# Altium footprint library TLV9034PWR.PcbLib: 4 footprints
Each footprint in its own frame and in the unit in brackets; x right, y up, seen from the top. Pads: shape width x height; smd on the part's side, far side on the other; paste and mask are expansions set on the pad; w line width, h text height; cw(c..) or ccw(c..) is an arc to the next point about the centre after c.
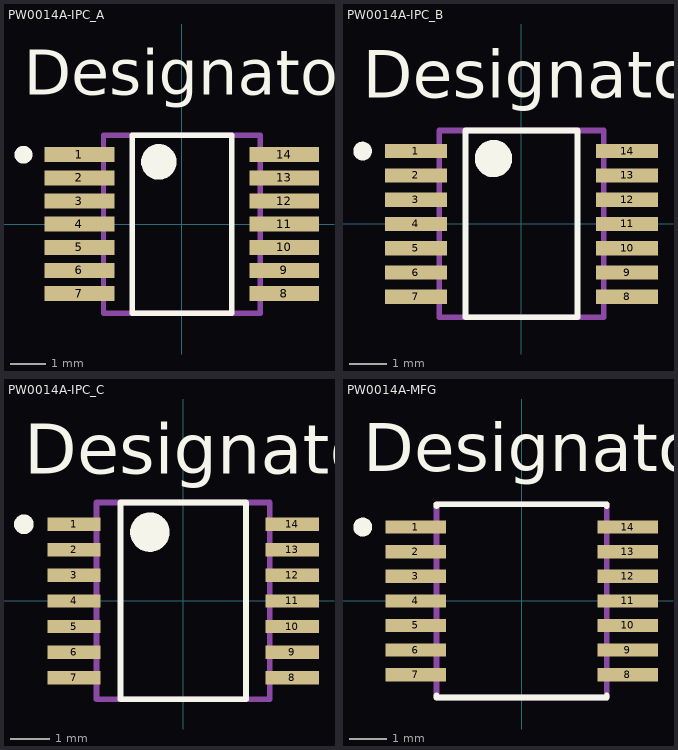
[diagram p0: the footprints below, top view; thin cyan lines are the x and y axes]

## PW0014A-IPC_A [mm]
pads (14):
  rect 1.955x0.421 smd paste+0 mask+0: 1(-2.875,1.95) 2(-2.875,1.3) 3(-2.875,0.65) 4(-2.875,0) 5(-2.875,-0.65) 6(-2.875,-1.3) 7(-2.875,-1.95) 8(2.875,-1.95) 9(2.875,-1.3) 10(2.875,-0.65) 11(2.875,0) 12(2.875,0.65) 13(2.875,1.3) 14(2.875,1.95)
Top Overlay:
  circle w0.25: c-4.45,1.95 r0.125
  circle w0.5: c-0.648,1.75 r0.25
  lines w0.15: -1.398,-2.5 -1.398,2.5 1.398,2.5 1.398,-2.5 -1.398,-2.5
  text "Designator786" at -4.445,3.632 h1.27
  text ".Designator" at -3.492,-0.635 h1.27
Mechanical 13:
  lines w0.15: -2.2,-2.5 -2.2,2.5 2.2,2.5 2.2,-2.5 -2.2,-2.5
  text ".Designator" at -3.492,-0.635 h1.27

## PW0014A-IPC_B [mm]
pads (14):
  rect 1.655x0.381 smd paste+0 mask+0: 1(-2.825,1.95) 2(-2.825,1.3) 3(-2.825,0.65) 4(-2.825,0) 5(-2.825,-0.65) 6(-2.825,-1.3) 7(-2.825,-1.95) 8(2.825,-1.95) 9(2.825,-1.3) 10(2.825,-0.65) 11(2.825,0) 12(2.825,0.65) 13(2.825,1.3) 14(2.825,1.95)
Top Overlay:
  circle w0.25: c-4.25,1.95 r0.125
  circle w0.5: c-0.748,1.75 r0.25
  lines w0.15: -1.498,-2.5 -1.498,2.5 1.498,2.5 1.498,-2.5 -1.498,-2.5
  text "Designator785" at -4.242,3.378 h1.27
  text ".Designator" at -3.492,-0.635 h1.27
Mechanical 13:
  lines w0.15: -2.2,-2.5 -2.2,2.5 2.2,2.5 2.2,-2.5 -2.2,-2.5
  text ".Designator" at -3.492,-0.635 h1.27

## PW0014A-IPC_C [mm]
pads (14):
  rect 1.355x0.341 smd paste+0 mask+0: 1(-2.775,1.95) 2(-2.775,1.3) 3(-2.775,0.65) 4(-2.775,0) 5(-2.775,-0.65) 6(-2.775,-1.3) 7(-2.775,-1.95) 8(2.775,-1.95) 9(2.775,-1.3) 10(2.775,-0.65) 11(2.775,0) 12(2.775,0.65) 13(2.775,1.3) 14(2.775,1.95)
Top Overlay:
  circle w0.25: c-4.05,1.95 r0.125
  circle w0.5: c-0.848,1.75 r0.25
  lines w0.15: -1.598,-2.5 -1.598,2.5 1.598,2.5 1.598,-2.5 -1.598,-2.5
  text "Designator784" at -4.038,3.238 h1.27
  text ".Designator" at -3.492,-0.635 h1.27
Mechanical 13:
  lines w0.15: -2.2,-2.5 -2.2,2.5 2.2,2.5 2.2,-2.5 -2.2,-2.5
  text ".Designator" at -3.492,-0.635 h1.27

## PW0014A-MFG [mm]
pads (14):
  rect 1.6x0.35 smd paste-0.787 mask+0: 1(-2.8,1.95) 2(-2.8,1.3) 3(-2.8,0.65) 4(-2.8,0) 5(-2.8,-0.65) 6(-2.8,-1.3) 7(-2.8,-1.95) 8(2.8,-1.95) 9(2.8,-1.3) 10(2.8,-0.65) 11(2.8,0) 12(2.8,0.65) 13(2.8,1.3) 14(2.8,1.95)
Top Overlay:
  circle w0.25: c-4.2,1.95 r0.125
  lines w0.15: -2.25,-2.5 -2.25,-2.55 2.25,-2.55 2.25,-2.5 ; -2.25,2.5 -2.25,2.55 2.25,2.55 2.25,2.5
  text "Designator783" at -4.191,3.429 h1.27
  text ".Designator" at -3.492,-0.635 h1.27
Top Paste:
  region: -3.525,-2.1 -3.575,-2.05 -3.575,-1.85 -3.525,-1.8 -2.075,-1.8 -2.025,-1.85 -2.025,-2.05 -2.075,-2.1
  region: -2.075,-1.15 -2.025,-1.2 -2.025,-1.4 -2.075,-1.45 -3.525,-1.45 -3.575,-1.4 -3.575,-1.2 -3.525,-1.15
  region: -3.525,-0.8 -3.575,-0.75 -3.575,-0.55 -3.525,-0.5 -2.075,-0.5 -2.025,-0.55 -2.025,-0.75 -2.075,-0.8
  region: -2.075,0.15 -2.025,0.1 -2.025,-0.1 -2.075,-0.15 -3.525,-0.15 -3.575,-0.1 -3.575,0.1 -3.525,0.15
  region: -2.075,0.5 -3.525,0.5 -3.575,0.55 -3.575,0.75 -3.525,0.8 -2.075,0.8 -2.025,0.75 -2.025,0.55
  region: -2.025,1.2 -2.075,1.15 -3.525,1.15 -3.575,1.2 -3.575,1.4 -3.525,1.45 -2.075,1.45 -2.025,1.4
  region: -2.025,2.05 -2.025,1.85 -2.075,1.8 -3.525,1.8 -3.575,1.85 -3.575,2.05 -3.525,2.1 -2.075,2.1
  region: 2.075,-2.1 2.025,-2.05 2.025,-1.85 2.075,-1.8 3.525,-1.8 3.575,-1.85 3.575,-2.05 3.525,-2.1
  region: 2.025,-1.4 2.025,-1.2 2.075,-1.15 3.525,-1.15 3.575,-1.2 3.575,-1.4 3.525,-1.45 2.075,-1.45
  region: 3.525,-0.5 3.575,-0.55 3.575,-0.75 3.525,-0.8 2.075,-0.8 2.025,-0.75 2.025,-0.55 2.075,-0.5
  region: 3.525,-0.15 2.075,-0.15 2.025,-0.1 2.025,0.1 2.075,0.15 3.525,0.15 3.575,0.1 3.575,-0.1
  region: 2.025,0.55 2.025,0.75 2.075,0.8 3.525,0.8 3.575,0.75 3.575,0.55 3.525,0.5 2.075,0.5
  region: 3.575,1.2 3.525,1.15 2.075,1.15 2.025,1.2 2.025,1.4 2.075,1.45 3.525,1.45 3.575,1.4
  region: 2.075,1.8 2.025,1.85 2.025,2.05 2.075,2.1 3.525,2.1 3.575,2.05 3.575,1.85 3.525,1.8
Mechanical 13:
  lines w0.15: -2.25,-2.55 -2.25,2.55 2.25,2.55 2.25,-2.55 -2.25,-2.55
  text ".Designator" at -3.492,-0.635 h1.27